# Altium footprint library SamacSys.PcbLib: 70 footprints (part 4 of 5)
Each footprint in its own frame and in the unit in brackets; x right, y up, seen from the top. Pads: shape width x height; smd on the part's side, far side on the other; paste and mask are expansions set on the pad; w line width, h text height; cw(c..) or ccw(c..) is an arc to the next point about the centre after c.
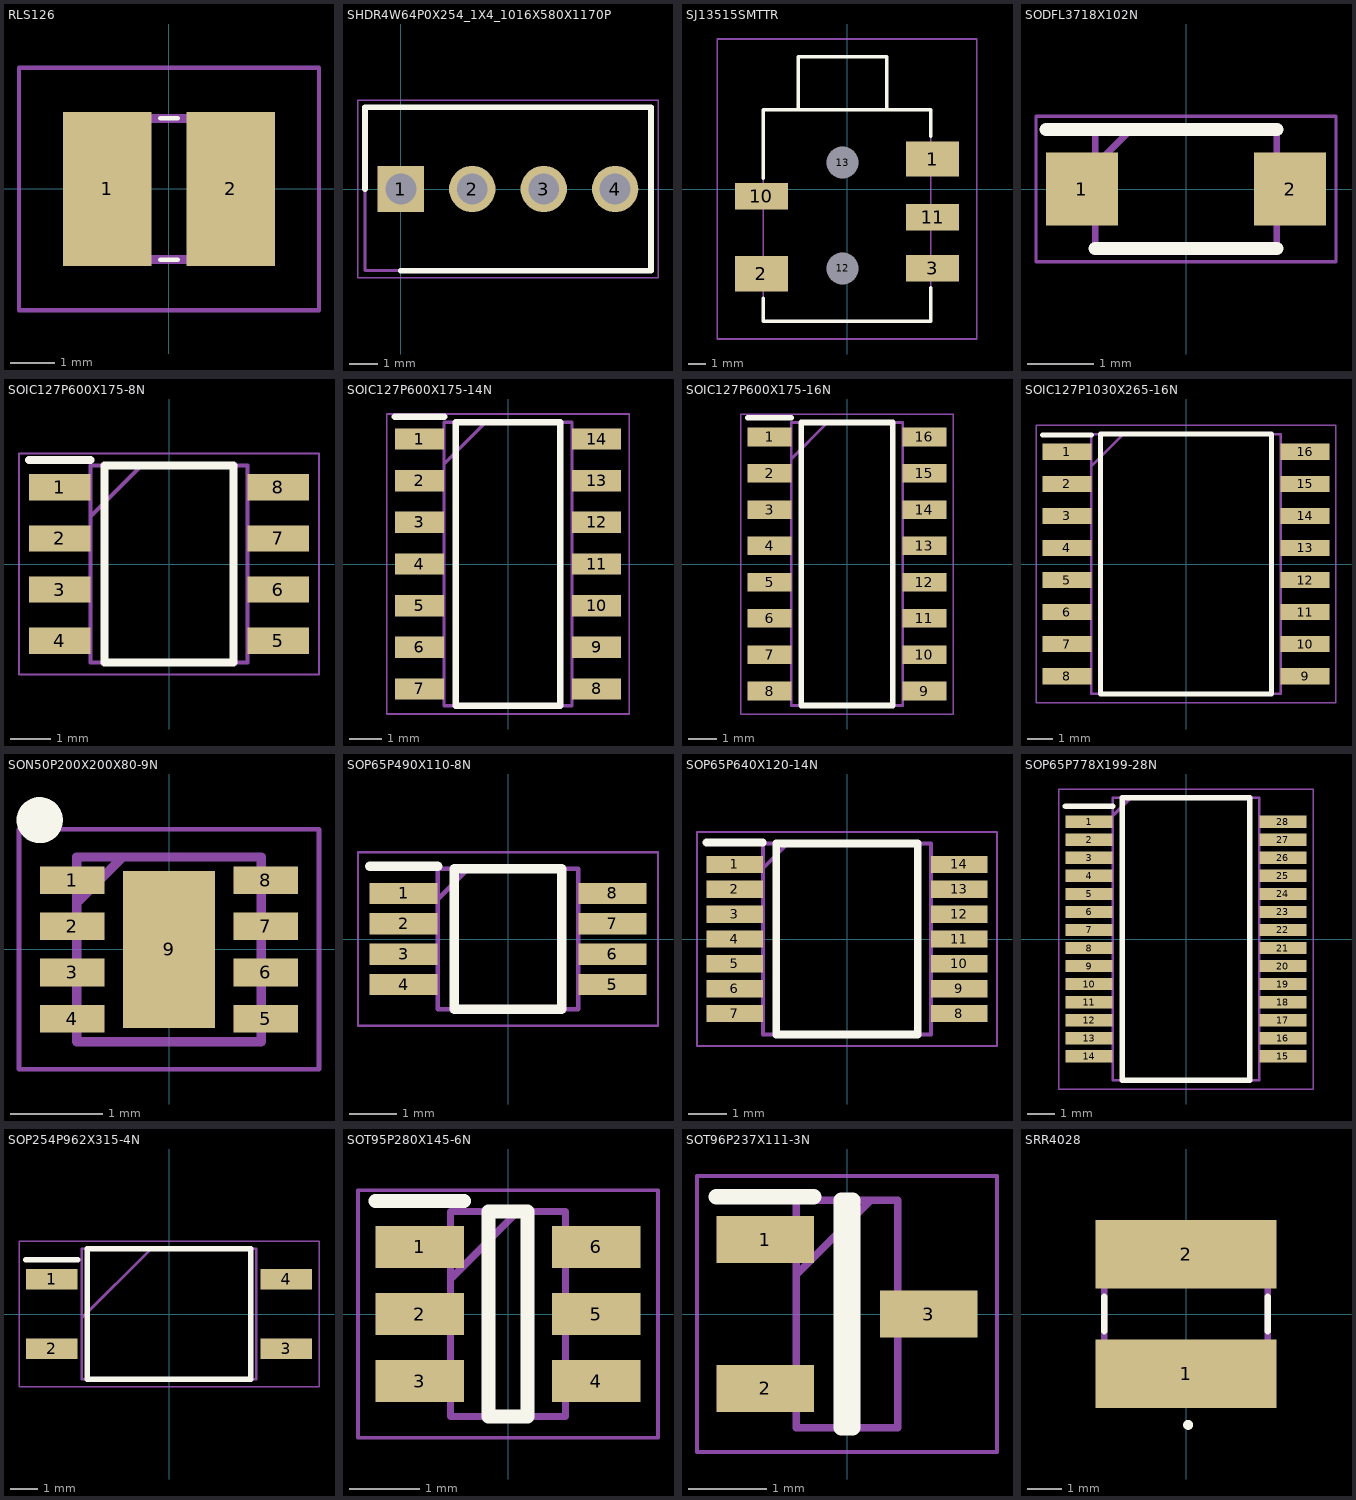
[diagram p3: the footprints below, top view; thin cyan lines are the x and y axes]

## RLS126 [mm]
pads (2):
  rect 2x3.5 smd: 1(-1.4,0) 2(1.4,0)
Top Overlay:
  lines w0.1: -0.2,-1.6 0.2,-1.6 ; -0.2,1.6 0.2,1.6
Mechanical 13:
  lines w0.2: -2.25,-1.6 -2.25,1.6 2.25,1.6 2.25,-1.6 -2.25,-1.6
Mechanical 15:
  lines w0.1: -3.4,-2.75 -3.4,2.75 3.4,2.75 3.4,-2.75 -3.4,-2.75
3D body "RLS-126.stp": height 2.6, standoff 0, extent -2.25,-1.6 2.25,1.6

## SHDR4W64P0X254_1X4_1016X580X1170P [mm]
pads (4):
  rect 1.65x1.65 hole 1.1: 1(0,0)
  round 1.65 hole 1.1: 2(2.54,0) 3(5.08,0) 4(7.62,0)
Top Overlay:
  lines w0.2: -1.27,0 -1.27,2.9 8.89,2.9 8.89,-2.9 0,-2.9
Mechanical 13:
  lines w0.1: -1.27,-2.9 8.89,-2.9 8.89,2.9 -1.27,2.9 -1.27,-2.9
Mechanical 15:
  lines w0.05: -1.52,-3.15 9.14,-3.15 9.14,3.15 -1.52,3.15 -1.52,-3.15
3D body "22-27-2041.stp": height 11.7, standoff -3.56, extent -1.27,-2.9 8.89,2.9

## SJ13515SMTTR [mm]
pads (7):
  rect 3x2 smd: 1(4.85,1.7) 2(-4.85,-4.8)
  rect 3x1.5 smd: 3(4.85,-4.5) 10(-4.85,-0.4) 11(4.85,-1.6)
  round 0.9 hole 1.8 unplated: 12(-0.25,-4.5) 13(-0.25,1.5)
Top Overlay:
  lines w0.2: -4.75,-6.2 -4.75,-7.5 4.75,-7.5 4.75,-5.6 ; -4.75,0.6 -4.75,4.5 4.75,4.5 4.75,3 ; -2.75,4.5 -2.75,7.5 2.25,7.5 2.25,4.5
Mechanical 13:
  lines w0.1: -2.75,4.5 -2.75,7.5 2.25,7.5 2.25,4.5 ; -4.75,-7.5 -4.75,4.5 4.75,4.5 4.75,-7.5 -4.75,-7.5
Mechanical 15:
  lines w0.1: -7.35,-8.5 -7.35,8.5 7.35,8.5 7.35,-8.5 -7.35,-8.5
3D body "SJ1-3515-SMT-TR.stp": height 5.08, standoff -0.52, extent -6.19,-7.34 5.81,7.66

## SODFL3718X102N [mm]
pads (2):
  rect 1.09x1.11 smd: 1(-1.575,0) 2(1.575,0)
Top Overlay:
  lines w0.2: -2.12,0.9 1.375,0.9 ; -1.375,-0.9 1.375,-0.9
Mechanical 13:
  lines w0.1: -1.375,0.355 -0.83,0.9 ; -1.375,-0.9 -1.375,0.9 1.375,0.9 1.375,-0.9 -1.375,-0.9
Mechanical 15:
  lines w0.05: -2.27,-1.1 -2.27,1.1 2.27,1.1 2.27,-1.1 -2.27,-1.1
3D body "SS34LWHRVG.stp": height 1.02, standoff 0, extent -1.85,-0.9 1.85,0.9

## SOIC127P600X175-8N [mm]
pads (8):
  rect 1.525x0.65 smd: 1(-2.712,1.905) 2(-2.712,0.635) 3(-2.712,-0.635) 4(-2.712,-1.905) 5(2.712,-1.905) 6(2.712,-0.635) 7(2.712,0.635) 8(2.712,1.905)
Top Overlay:
  lines w0.2: -3.475,2.58 -1.95,2.58 ; -1.6,-2.45 1.6,-2.45 1.6,2.45 -1.6,2.45 -1.6,-2.45
Mechanical 13:
  lines w0.1: -1.95,1.18 -0.68,2.45 ; -1.95,-2.45 1.95,-2.45 1.95,2.45 -1.95,2.45 -1.95,-2.45
Mechanical 15:
  lines w0.05: -3.725,-2.75 3.725,-2.75 3.725,2.75 -3.725,2.75 -3.725,-2.75
3D body "NE555DR.stp": height 1.75, standoff 0, extent -3,-2.45 3,2.45

## SOIC127P600X175-14N [mm]
pads (14):
  rect 1.5x0.65 smd: 1(-2.7,3.81) 2(-2.7,2.54) 3(-2.7,1.27) 4(-2.7,0) 5(-2.7,-1.27) 6(-2.7,-2.54) 7(-2.7,-3.81) 8(2.7,-3.81) 9(2.7,-2.54) 10(2.7,-1.27) 11(2.7,0) 12(2.7,1.27) 13(2.7,2.54) 14(2.7,3.81)
Top Overlay:
  lines w0.2: -3.45,4.485 -1.95,4.485 ; -1.6,-4.325 -1.6,4.325 1.6,4.325 1.6,-4.325 -1.6,-4.325
Mechanical 13:
  lines w0.1: -1.95,3.055 -0.68,4.325 ; -1.95,-4.325 -1.95,4.325 1.95,4.325 1.95,-4.325 -1.95,-4.325
Mechanical 15:
  lines w0.05: -3.7,-4.575 -3.7,4.575 3.7,4.575 3.7,-4.575 -3.7,-4.575
3D body "PIC16F18426T-I_SL.stp": height 1.75, standoff 0, extent -3,-4.325 3,4.325

## SOIC127P600X175-16N [mm]
pads (16):
  rect 1.525x0.65 smd: 1(-2.712,4.445) 2(-2.712,3.175) 3(-2.712,1.905) 4(-2.712,0.635) 5(-2.712,-0.635) 6(-2.712,-1.905) 7(-2.712,-3.175) 8(-2.712,-4.445) 9(2.712,-4.445) 10(2.712,-3.175) 11(2.712,-1.905) 12(2.712,-0.635) 13(2.712,0.635) 14(2.712,1.905) 15(2.712,3.175) 16(2.712,4.445)
Top Overlay:
  lines w0.2: -3.475,5.12 -1.95,5.12 ; -1.6,-4.95 -1.6,4.95 1.6,4.95 1.6,-4.95 -1.6,-4.95
Mechanical 13:
  lines w0.1: -1.95,3.68 -0.68,4.95 ; -1.95,-4.95 -1.95,4.95 1.95,4.95 1.95,-4.95 -1.95,-4.95
Mechanical 15:
  lines w0.05: -3.725,-5.25 -3.725,5.25 3.725,5.25 3.725,-5.25 -3.725,-5.25
3D body "SN74HC595DRG4.stp": height 1.75, standoff 0, extent -3.013,-4.94 3.013,4.96

## SOIC127P1030X265-16N [mm]
pads (16):
  rect 1.95x0.65 smd: 1(-4.725,4.445) 2(-4.725,3.175) 3(-4.725,1.905) 4(-4.725,0.635) 5(-4.725,-0.635) 6(-4.725,-1.905) 7(-4.725,-3.175) 8(-4.725,-4.445) 9(4.725,-4.445) 10(4.725,-3.175) 11(4.725,-1.905) 12(4.725,-0.635) 13(4.725,0.635) 14(4.725,1.905) 15(4.725,3.175) 16(4.725,4.445)
Top Overlay:
  lines w0.2: -5.7,5.12 -3.75,5.12 ; -3.4,-5.15 -3.4,5.15 3.4,5.15 3.4,-5.15 -3.4,-5.15
Mechanical 13:
  lines w0.1: -3.75,3.88 -2.48,5.15 ; -3.75,-5.15 -3.75,5.15 3.75,5.15 3.75,-5.15 -3.75,-5.15
Mechanical 15:
  lines w0.05: -5.95,-5.5 -5.95,5.5 5.95,5.5 5.95,-5.5 -5.95,-5.5
3D body "AMC3330DWE.stp": height 2.59, standoff 0, extent -5.167,-5.15 5.167,5.15

## SON50P200X200X80-9N [mm]
pads (9):
  rect 0.7x0.3 smd: 1(-1.05,0.75) 2(-1.05,0.25) 3(-1.05,-0.25) 4(-1.05,-0.75) 5(1.05,-0.75) 6(1.05,-0.25) 7(1.05,0.25) 8(1.05,0.75)
  rect 1x1.7 smd: 9(0,0)
Top Overlay:
  circle w0.25: c-1.4,1.4 r0.125
Mechanical 13:
  lines w0.1: -1,0.5 -0.5,1 ; -1,-1 -1,1 1,1 1,-1 -1,-1
Mechanical 15:
  lines w0.05: -1.625,-1.3 -1.625,1.3 1.625,1.3 1.625,-1.3 -1.625,-1.3
3D body "TPS62162DSGR.stp": height 0.8, standoff 0, extent -1.05,-1 1.05,1

## SOP65P490X110-8N [mm]
pads (8):
  rect 1.45x0.45 smd: 1(-2.225,0.975) 2(-2.225,0.325) 3(-2.225,-0.325) 4(-2.225,-0.975) 5(2.225,-0.975) 6(2.225,-0.325) 7(2.225,0.325) 8(2.225,0.975)
Top Overlay:
  lines w0.2: -2.95,1.55 -1.5,1.55 ; -1.15,-1.5 -1.15,1.5 1.15,1.5 1.15,-1.5 -1.15,-1.5
Mechanical 13:
  lines w0.1: -1.5,0.85 -0.85,1.5 ; -1.5,-1.5 -1.5,1.5 1.5,1.5 1.5,-1.5 -1.5,-1.5
Mechanical 15:
  lines w0.05: -3.2,-1.85 -3.2,1.85 3.2,1.85 3.2,-1.85 -3.2,-1.85
3D body "AD8236ARMZ-R7.stp": height 1, standoff 0, extent -2.45,-1.5 2.45,1.5

## SOP65P640X120-14N [mm]
pads (14):
  rect 1.475x0.45 smd: 1(-2.938,1.95) 2(-2.938,1.3) 3(-2.938,0.65) 4(-2.938,0) 5(-2.938,-0.65) 6(-2.938,-1.3) 7(-2.938,-1.95) 8(2.938,-1.95) 9(2.938,-1.3) 10(2.938,-0.65) 11(2.938,0) 12(2.938,0.65) 13(2.938,1.3) 14(2.938,1.95)
Top Overlay:
  lines w0.2: -3.675,2.525 -2.2,2.525 ; -1.85,-2.5 -1.85,2.5 1.85,2.5 1.85,-2.5 -1.85,-2.5
Mechanical 13:
  lines w0.1: -2.2,1.85 -1.55,2.5 ; -2.2,-2.5 -2.2,2.5 2.2,2.5 2.2,-2.5 -2.2,-2.5
Mechanical 15:
  lines w0.05: -3.925,-2.8 -3.925,2.8 3.925,2.8 3.925,-2.8 -3.925,-2.8
3D body "TSZ124IPT.stp": height 1.2, standoff 0, extent -3.2,-2.5 3.2,2.5

## SOP65P778X199-28N [mm]
pads (28):
  rect 1.705x0.45 smd: 1(-3.498,4.225) 2(-3.498,3.575) 3(-3.498,2.925) 4(-3.498,2.275) 5(-3.498,1.625) 6(-3.498,0.975) 7(-3.498,0.325) 8(-3.498,-0.325) 9(-3.498,-0.975) 10(-3.498,-1.625) 11(-3.498,-2.275) 12(-3.498,-2.925) 13(-3.498,-3.575) 14(-3.498,-4.225) 15(3.498,-4.225) 16(3.498,-3.575) 17(3.498,-2.925) 18(3.498,-2.275) 19(3.498,-1.625) 20(3.498,-0.975) 21(3.498,-0.325) 22(3.498,0.325) 23(3.498,0.975) 24(3.498,1.625) 25(3.498,2.275) 26(3.498,2.925) 27(3.498,3.575) 28(3.498,4.225)
Top Overlay:
  lines w0.2: -4.35,4.8 -2.645,4.8 ; -2.295,-5.1 -2.295,5.1 2.295,5.1 2.295,-5.1 -2.295,-5.1
Mechanical 13:
  lines w0.1: -2.645,4.45 -1.995,5.1 ; -2.645,-5.1 -2.645,5.1 2.645,5.1 2.645,-5.1 -2.645,-5.1
Mechanical 15:
  lines w0.05: -4.6,-5.415 -4.6,5.415 4.6,5.415 4.6,-5.415 -4.6,-5.415
3D body "ATM90E26-YU-R.stp": height 1.99, standoff 0, extent -3.888,-5.1 3.888,5.1

## SOP254P962X315-4N [mm]
pads (4):
  rect 1.9x0.75 smd: 1(-4.3,1.27) 2(-4.3,-1.27) 3(4.3,-1.27) 4(4.3,1.27)
Top Overlay:
  lines w0.2: -5.25,1.995 -3.35,1.995 ; -3,-2.39 -3,2.39 3,2.39 3,-2.39 -3,-2.39
Mechanical 13:
  lines w0.1: -3.2,-0.15 -0.66,2.39 ; -3.2,-2.39 -3.2,2.39 3.2,2.39 3.2,-2.39 -3.2,-2.39
Mechanical 15:
  lines w0.05: -5.5,-2.665 -5.5,2.665 5.5,2.665 5.5,-2.665 -5.5,-2.665
3D body "AQY-414EHAX.stp": height 3.15, standoff 0, extent -4.81,-2.39 4.81,2.39

## SOT95P280X145-6N [mm]
pads (6):
  rect 1.25x0.6 smd: 1(-1.25,0.95) 2(-1.25,0) 3(-1.25,-0.95) 4(1.25,-0.95) 5(1.25,0) 6(1.25,0.95)
Top Overlay:
  lines w0.2: -1.875,1.6 -0.625,1.6 ; -0.275,-1.45 -0.275,1.45 0.275,1.45 0.275,-1.45 -0.275,-1.45
Mechanical 13:
  lines w0.1: -0.812,0.5 0.138,1.45 ; -0.812,-1.45 -0.812,1.45 0.812,1.45 0.812,-1.45 -0.812,-1.45
Mechanical 15:
  lines w0.05: -2.125,-1.75 -2.125,1.75 2.125,1.75 2.125,-1.75 -2.125,-1.75
3D body "MAX16150AUT+T.stp": height 1.2, standoff 0, extent -1.32,-1.4 1.48,1.5

## SOT96P237X111-3N [mm]
pads (3):
  rect 1.25x0.6 smd: 1(-1.05,0.955) 2(-1.05,-0.955) 3(1.05,0)
Top Overlay:
  lines w0.2: -1.675,1.505 -0.425,1.505 ; -0.075,-1.46 -0.075,1.46 0.075,1.46 0.075,-1.46 -0.075,-1.46
Mechanical 13:
  lines w0.1: -0.65,0.505 0.305,1.46 ; -0.65,-1.46 -0.65,1.46 0.65,1.46 0.65,-1.46 -0.65,-1.46
Mechanical 15:
  lines w0.05: -1.925,-1.77 -1.925,1.77 1.925,1.77 1.925,-1.77 -1.925,-1.77
3D body "MMBT3904LT1G.stp": height 1.11, standoff 0, extent -1.185,-1.46 1.185,1.46

## SRR4028 [mm]
pads (2):
  rect 5.3x2 smd: 1(0,-1.75) 2(0,1.75)
Top Overlay:
  circle w0.2: c0.063,-3.252 r0.045
  lines w0.2: -2.4,-0.5 -2.4,0.5 ; 2.4,-0.5 2.4,0.5
Mechanical 13:
  lines w0.2: -2.4,-2.4 -2.4,2.4 2.4,2.4 2.4,-2.4 -2.4,-2.4
3D body "SRR4028-2R2Y.stp": height 2.8, standoff 0, extent -2.4,-2.4 2.4,2.4